# Altium schematic symbol library Brian_.SchLib: 123 symbols (part 4 of 4)
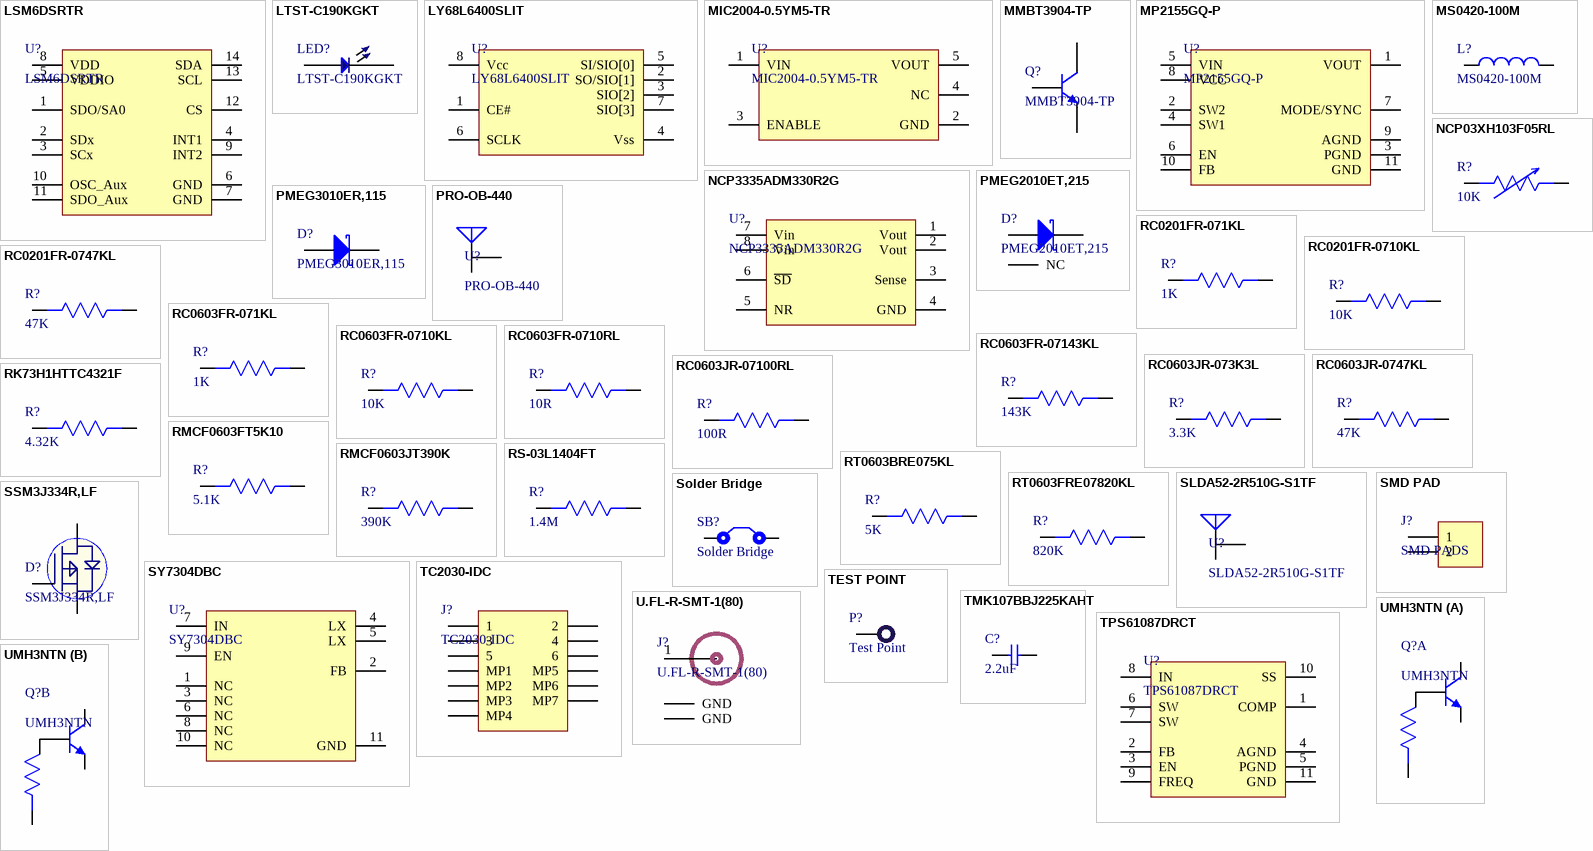
[diagram p6: symbols LSM6DSRTR to UMH3NTN]

## RT0603BRE075KL
designator R?, comment 5K
RES 5K OHM 0.1% 1/10W 0603; Manufacturer: Yageo; Manufacturer Part Number: RT0603BRE075KL; Resistance: 5kR; Max Power Dissipation: 100mW; Temperature Coefficient: 50ppm/°C; Supplier 1: Avnet; RoHS: No; Category: Chip SMD Resistors; Pricing 1: 5000=0.03371, 10000=0.03324, 20000=0.03229, 30000=0.03157, 40000=0.03039, 50000=0.02968, 500000=0.02896 (USD); Case/Package: 0603; Min Operating Temperature: -55°C; Max Operating Temperature: 155°C; Resistor Type: Thin Film; Packaging: Tape and Reel; Tolerance: 0.1%; Number of Terminations: 2; ComponentLink1URL: http://www.yageo.com/documents/recent/PYu-RT_1-to-0.01_RoHS_L_9.pdf?src-supplier=Digi-Key; ComponentLink1Description: http://www.yageo.com/documents/recent/PYu-RT_1-to-0.01_RoHS_L_9.pdf?src-supplier=Digi-Key; Supplier Part Number 1: RT0603BRE075KL
footprint Res0603
pins: 1, 2

## RT0603FRE07820KL
designator R?, comment 820K
RES SMD 820K OHM 1% 1/10W 0603; Manufacturer: Yageo; Manufacturer Part Number: RT0603FRE07820KL; Resistance: 820kR; Max Power Dissipation: 100mW; Temperature Coefficient: 50ppm/°C; Supplier 1: Digi-Key; RoHS: Yes; Category: Chip SMD Resistors; Stock 1: 7342; Pricing 1: 1=0.10000, 10=0.07000, 100=0.02830, 1000=0.01272, 2500=0.01104 (USD); Case/Package: 0603; Min Operating Temperature: -55°C; Max Operating Temperature: 155°C; Packaging: Tape and Reel; Resistor Type: Thin Film; Number of Terminations: 2; Tolerance: 1%; Features: Moisture Resistant; Length: 0.063inch; Width: 0.031inch; Height: 0.022inch; RoHS Compliant: Yes; ComponentLink1URL: http://www.yageo.com/documents/recent/PYu-RT_1-to-0.01_RoHS_L_8.pdf?src-supplier=Digi-Key; ComponentLink1Description: http://www.yageo.com/documents/recent/PYu-RT_1-to-0.01_RoHS_L_8.pdf?src-supplier=Digi-Key; Supplier Part Number 1: 13-RT0603FRE07820KLCT-ND
footprint Res0603
pins: 1, 2

## SLDA52-2R510G-S1TF
designator U?
RF ANT 2.51GHZ CHIP SOLDER SMD; Manufacturer: Sunlord; Supplier 1: Digi-Key; Manufacturer Part Number: SLDA52-2R510G-S1TF; Stock 1: 0; Pricing 1: 4000=0.3 (USD); Supplier Part Number 1: 3442-SLDA52-2R510G-S1TFTR-ND
footprint SLDA52-2R510G-S1TF
pins: 1 A, 2 A

## SMD PAD
designator J?, comment SMD PADS
footprint SMD PAD (SMD 0805)
pins: 1, 2

## Solder Bridge
designator SB?
Solder Bridge ON
footprint Solder Bridge (Solder Bridge ON)
pins: 1, 2

## SSM3J334R,LF
designator D?
MOSFET P-CH 30V 4A SOT23F; Manufacturer: Toshiba; Number of Elements: 1; Element Configuration: Single; Drain to Source Breakdown Voltage: -30V; Rds On Max: 71mR; Input Capacitance: 280pF; Gate to Source Voltage (Vgs): 20V; Drain to Source Resistance: 136mR; Power Dissipation: 1W; Supplier 1: Digi-Key; Manufacturer Part Number: SSM3J334R,LF; RoHS: Yes; Category: MOSFETs; Stock 1: 79343; Pricing 1: 1=0.47000, 10=0.33100, 25=0.30800, 100=0.16720, 500=0.13640, 1000=0.10120 (USD); Mount: Surface Mount; Case/Package: SOT-23-3; Number of Pins: 3; Min Operating Temperature: -55°C; Max Operating Temperature: 150°C; Packaging: Tape and Reel; Package Quantity: 1; Drain to Source Voltage (Vdss): 30V; Continuous Drain Current (ID): 4A; Max Power Dissipation: 1W; ComponentLink1URL: https://datasheet.ciiva.com/6375/ssm3j334r-datasheet-en-20140301-6375723.pdf?src-supplier=Digi-Key; ComponentLink1Description: https://datasheet.ciiva.com/6375/ssm3j334r-datasheet-en-20140301-6375723.pdf?src-supplier=Digi-Key; ComponentLink2URL: https://datasheet.ciiva.com/6373/ssm3j334r-datasheet-en-20140301-6373837.pdf?src-supplier=Digi-Key; ComponentLink2Description: https://datasheet.ciiva.com/6373/ssm3j334r-datasheet-en-20140301-6373837.pdf?src-supplier=Digi-Key; Supplier Part Number 1: SSM3J334RLFCT-ND
footprint SOT-23F
pins: 1 G, 2 S, 3 D

## SY7304DBC
designator U?
33V 4A DFN-10 DC-DC Converters RoHS; Manufacturer: Silergy Corp; Function: Step-Up; Output Configuration: Positive; Topology: Boost; Output Type: Adjustable; Number of Outputs: 1; Voltage - Input (Min): 3V; Voltage - Output (Min/Fixed): 0.6V; Frequency - Switching: 1MHz; Package: DFN-10; Voltage - Input (Max): 33V; Voltage - Output (Max): 33V; Current - Output: 4A
footprint DFN-10 (33V 4A DFN-10 DC-DC Converters RoHS)
pins: 1 NC, 2 FB, 3 NC, 4 LX, 5 LX, 6 NC, 7 IN, 8 NC, 9 EN, 10 NC, 11 GND

## TC2030-IDC
designator J?
CABLE ADAPTER 6 POS; Manufacturer: Tag-Connect; ComponentLink1URL: http://www.tag-connect.com/Materials/TC2030-MCP%20Datasheet.pdf?src-supplier=Digi-Key; ComponentLink1Description: http://www.tag-connect.com/Materials/TC2030-MCP%20Datasheet.pdf?src-supplier=Digi-Key; Supplier 1: Digi-Key; Manufacturer Part Number: TC2030-IDC; Stock 1: 284; Pricing 1: 1=43.71 (USD); Package Quantity: 1; Supplier Part Number 1: TC2030-IDC-ND
footprint TC2030-IDC (CABLE ADAPTER 6 POS)
pins: 1, 2, 3, 4, 5, 6, MP1, MP2, MP3, MP4, MP5, MP6, MP7

## TEST POINT
designator P?, comment Test Point
Test Point ON
footprint TEST POINT
pins: 1

## TMK107BBJ225KAHT
designator C?, comment 2.2uF
2.2uF ±10% 25V X5R 0603 Multilayer Ceramic Capacitors MLCC - SMD/SMT RoHS; Manufacturer: Taiyo Yuden; Manufacturer Part No: TMK107BBJ225KAHT; Package: 0603; Value: 2.2uF
footprint Cap0603
pins: 1, 2

## TPS61087DRCT
designator U?
IC REG BOOST ADJ 3.2A 10SON; Manufacturer: Texas Instruments; Output Voltage: 18.5V; Number of Outputs: 1; Switching Frequency: 1.5MHz; Max Input Voltage: 6V; Min Input Voltage: 2.5V; Synchronous Rectifier: No; Min Output Voltage: 3V; Quiescent Current: 75uA; Output Type: Adjustable; Frequency: 1.2MHz; Supplier 1: Digi-Key; Manufacturer Part Number: TPS61087DRCT; RoHS: Yes; Category: Voltage Regulators - Switching; Stock 1: 8; Pricing 1: 1=2.47000, 10=2.21600, 25=2.09080, 100=1.78140 (USD); Case/Package: VSON; Number of Pins: 10; Weight: 0.000885oz; Contact Plating: Gold; Min Operating Temperature: -40°C; Max Operating Temperature: 85°C; Output Current: 3.2A; Package Quantity: 1; Packaging: Tape and Reel; Max Output Current: 3.2A; Max Output Voltage: 18.5V; Topology: Boost; Operating Supply Voltage: 6V; Series: -; Min Supply Voltage: 2.5V; Termination: SMD/SMT; Length: 3mm; Width: 3mm; Height: 0.9mm; Lead Free: Lead Free; RoHS Compliant: Yes; REACH SVHC: No SVHC; ComponentLink1URL: https://datasheet.ciiva.com/26900/tps61087drct-26900849.pdf?src-supplier=IIIC; ComponentLink1Description: https://datasheet.ciiva.com/26900/tps61087drct-26900849.pdf?src-supplier=IIIC; ComponentLink2URL: https://datasheet.ciiva.com/2026/tps61087-2026442.pdf?src-supplier=Digi-Key; ComponentLink2Description: https://datasheet.ciiva.com/2026/tps61087-2026442.pdf?src-supplier=Digi-Key; ComponentLink3URL: https://datasheet.ciiva.com/7993/1853604-7993946.pdf?src-supplier=Element14; ComponentLink3Description: https://datasheet.ciiva.com/7993/1853604-7993946.pdf?src-supplier=Element14; ComponentLink4URL: https://datasheet.ciiva.com/2026/tps61087-2026443.pdf?src-supplier=Digi-Key; ComponentLink4Description: https://datasheet.ciiva.com/2026/tps61087-2026443.pdf?src-supplier=Digi-Key; ComponentLink5URL: https://datasheet.ciiva.com/2026/tps61087-2026444.pdf?src-supplier=Digi-Key; ComponentLink5Description: https://datasheet.ciiva.com/2026/tps61087-2026444.pdf?src-supplier=Digi-Key; ComponentLink6URL: https://datasheet.ciiva.com/7143/1853604-7143100.pdf?src-supplier=Newark; ComponentLink6Description: https://datasheet.ciiva.com/7143/1853604-7143100.pdf?src-supplier=Newark; ComponentLink7URL: https://datasheet.ciiva.com/14377/tps61087-14377084.pdf?src-supplier=Avnet; ComponentLink7Description: https://datasheet.ciiva.com/14377/tps61087-14377084.pdf?src-supplier=Avnet; Supplier Part Number 1: 296-23426-1-ND
footprint 10-VSON (3x3)
pins: 1 COMP, 2 FB, 3 EN, 4 AGND, 5 PGND, 6 SW, 7 SW, 8 IN, 9 FREQ, 10 SS, 11 GND

## U.FL-R-SMT-1(80)
designator J?
CONN U.FL RCPT STR 50 OHM SMD; Manufacturer: Hirose; Supplier 1: Future Electronics; Manufacturer Part Number: U.FL-R-SMT-1(80); Stock 1: 1272; Pricing 1: 1=1.07, 500=0.785, 1500=0.74, 2500=0.72, 5000=0.695 (USD); Case/Package: SMD/SMT; Package Quantity: 10000; Packaging: Tape and Reel; Lead Free: Lead Free; ComponentLink1URL: https://www.hirose.com/product/en/download_file/key_name/U.FL-R-SMT-1%2880%29/category/Specification%20Sheet/doc_file_id/37638/?file_category_id=9&item_id=03310472280&is_series=&src-supplier=Digi-Key; ComponentLink1Description: https://www.hirose.com/product/en/download_file/key_name/U.FL-R-SMT-1%2880%29/category/Specification%20Sheet/doc_file_id/37638/?file_category_id=9&item_id=03310472280&is_series=&src-supplier=Digi-Key; ComponentLink2URL: http://www.mouser.com/ds/2/185/U.FL_catalog-939761.pdf?src-supplier=Mouser; ComponentLink2Description: http://www.mouser.com/ds/2/185/U.FL_catalog-939761.pdf?src-supplier=Mouser; Supplier Part Number 1: U.FL-R-SMT-1(80)-CUTT
footprint U.FL-R-SMT-1(80)
pins: 1 RF_IN, 2 GND, 3 GND

## UMH3NTN
designator Q?
TRANS 2NPN PREBIAS 0.15W UMT6; Manufacturer: Rohm; Collector Emitter Voltage (VCEO): 50V; Emitter Base Voltage (VEBO): 5V; Max Collector Current: 100mA; Element Configuration: Dual; hFE Min: 100; Polarity: NPN; Power Dissipation: 150mW; Transition Frequency: 250MHz; Supplier 1: Digi-Key; Manufacturer Part Number: UMH3NTN; Stock 1: 12797; Pricing 1: 1=0.39, 10=0.293, 25=0.264, 100=0.1392, 500=0.12336, 1000=0.096 (USD); Mount: Surface Mount; Case/Package: SOT-363; Number of Pins: 6; Min Operating Temperature: -55°C; Max Operating Temperature: 150°C; Max Output Current: 100mA; Operating Supply Voltage: 50V; Packaging: Tape and Reel; Package Quantity: 1; Continuous Collector Current: 100mA; Collector Emitter Breakdown Voltage: 50V; Max Power Dissipation: 150mW; Max Breakdown Voltage: 50V; Voltage Rating (DC): 50V; Current Rating: 100mA; Collector Base Voltage (VCBO): 50V; Radiation Hardening: No; REACH SVHC: No SVHC; Lead Free: Lead Free; ComponentLink1URL: http://www.farnell.com/datasheets/1645293.pdf?src-supplier=Element14; ComponentLink1Description: http://www.farnell.com/datasheets/1645293.pdf?src-supplier=Element14; ComponentLink2URL: http://rohmfs.rohm.com/en/products/databook/datasheet/discrete/transistor/digital/emh3t2r-e.pdf?src-supplier=Digi-Key; ComponentLink2Description: http://rohmfs.rohm.com/en/products/databook/datasheet/discrete/transistor/digital/emh3t2r-e.pdf?src-supplier=Digi-Key; ComponentLink3URL: http://rohmfs.rohm.com/en/techdata_basic/transistor/taping/UMT6_TN_taping.pdf?src-supplier=Digi-Key; ComponentLink3Description: http://rohmfs.rohm.com/en/techdata_basic/transistor/taping/UMT6_TN_taping.pdf?src-supplier=Digi-Key; ComponentLink4URL: http://www.produktinfo.conrad.com/datenblaetter/125000-149999/140593-da-01-en-TRANSISTOR_UMH3_NTN_SOT_363.pdf?src-supplier=Conrad; ComponentLink4Description: http://www.produktinfo.conrad.com/datenblaetter/125000-149999/140593-da-01-en-TRANSISTOR_UMH3_NTN_SOT_363.pdf?src-supplier=Conrad; Supplier Part Number 1: UMH3NTNCT-ND
footprint SOT-363 (Dual Digital Transistors)
part A pins: 1 DTr1 E , 2 DTr1 B, 6 DTr1 C
part B pins: 3 DTr2 C, 4 DTr2 E, 5 DTr2 B

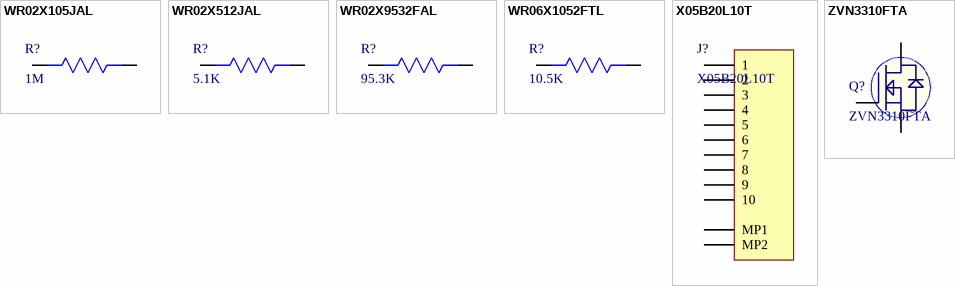
[diagram p3: symbols WR02X105JAL to ZVN3310FTA]

## WR02X105JAL
designator R?, comment 1M
Res Thick Film 0201 1M Ohm 5% 0.05W(1/20W) ±200ppm/C Molded SMD Paper T/R; Manufacturer: Walsin Technologies; Manufacturer Part Number: WR02X105JAL; Resistance: 1MR; Supplier 1: Digi-Key; RoHS: Yes; Category: Uncategorized; Stock 1: 6920; Pricing 1: 1=0.10000, 10=0.01800, 100=0.00750, 1000=0.00335, 2500=0.00291, 5000=0.00240 (USD); Case/Package: 0201; Min Operating Temperature: -55°C; Max Operating Temperature: 125°C; Resistor Type: Thick Film; Tolerance: 5%; Packaging: Tape and Reel; Length: 0.6mm; Depth: 0.3mm; Military Standard: Not; ComponentLink1URL: http://components.arrow.com/part/dataview/0323_00666329?src-supplier=Arrow+Europe; ComponentLink1Description: http://components.arrow.com/part/dataview/0323_00666329?src-supplier=Arrow+Europe; Supplier Part Number 1: 1292-WR02X105JALCT-ND
footprint Res-0201
pins: 1, 2

## WR02X512JAL
designator R?, comment 5.1K
Res 5.1K Ohm 5% 1/20W 0201; Manufacturer: Walsin Technologies; Manufacturer Part Number: WR02X512JAL; Supplier 1: DigiKey; Pricing 1: 15000=0.00209 (USD); RoHS Compliant: Yes; Supplier Part Number 1: 1292-WR02X512JALTR-ND
footprint Res-0201
pins: 1, 2

## WR02X9532FAL
designator R?, comment 95.3K
Res 95.3K Ohm 1% 1/20W 0201; Manufacturer: Walsin Technologies; Manufacturer Part Number: WR02X9532FAL; Supplier 1: Digi-Key; Pricing 1: 15000=0.00247 (USD); Supplier Part Number 1: 1292-WR02X9532FALTR-ND
footprint Res-0201
pins: 1, 2

## WR06X1052FTL
designator R?, comment 10.5K
10.5kΩ ±1% 0.1W ±100ppm/℃ 0603 Chip Resistor - Surface Mount RoHS; Manufacturer: Walsin Technologies; Manufacturer Part Number: WR06X1052FTL; Power Rating: 100mW; Voltage Rating (DC): 75V; Resistance: 10500R; Supplier 1: Digi-Key; RoHS: Yes; Category: Resistors; Pricing 1: 5000=0.00181 (USD); Case/Package: Molded; Contact Material: Tin; Tolerance: 1%; Lead Free: Lead Free; RoHS Compliant: Yes; ComponentLink1URL: http://components.arrow.com/part/dataview/0323_00667342?src-supplier=Arrow+Europe; ComponentLink1Description: http://components.arrow.com/part/dataview/0323_00667342?src-supplier=Arrow+Europe; ComponentLink2URL: http://www.farnell.com/datasheets/1960319.pdf?src-supplier=Farnell; ComponentLink2Description: http://www.farnell.com/datasheets/1960319.pdf?src-supplier=Farnell; Supplier Part Number 1: 1292-WR06X1052FTLTR-ND
footprint Res0603
pins: 1, 2

## X05B20L10T
designator J?
Bottom Contact 10 0.020"（0.50mm） 0.079"（2.00mm） Slide Lock SMD,P=0.5mm FFC, FPC Connectors RoHS; Manufacturer: XKB Connectivity; Number of Positions: 10; FFC, FCB Thickness: 0.30mm; Package: SMD,P=0.5mm; Packaging: Tube-packed; Flat Flex Type: FPC; Contact Type: Bottom Contact; Pitch: 0.020"（0.50mm; Height Above Board: 0.079"（2.00mm）; Locking Feature: Slide Lock
footprint X05B20L10T (Bottom Contact 10 0.020"(0.50mm) 0.079"(2.00mm) Slide Lock SMD,P=0.5mm FFC, FPC Connectors RoHS)
pins: 1, 2, 3, 4, 5, 6, 7, 8, 9, 10, MP1, MP2

## ZVN3310FTA
designator Q?
MOSFET N-CH 100V .1A SOT23-3; Manufacturer: Diodes Zetex; Rise Time: 5ns; Continuous Drain Current (ID): 100mA; Gate to Source Voltage (Vgs): 20V; Turn-Off Delay Time: 4ns; Turn-On Delay Time: 3ns; Rds On Max: 10R; Input Capacitance: 40pF; Nominal Vgs: 2.4V; Max Power Dissipation: 330mW; Number of Elements: 1; Element Configuration: Single; Supplier 1: Digi-Key; Manufacturer Part Number: ZVN3310FTA; Stock 1: 16974; Pricing 1: 1=0.59, 10=0.517, 25=0.4852, 100=0.3522, 250=0.33972, 500=0.29432, 1000=0.25048 (USD); Mount: Surface Mount; Case/Package: SOT-23; Number of Pins: 3; Weight: 0.000282oz; Min Operating Temperature: -55°C; Max Operating Temperature: 150°C; Package Quantity: 3000; Packaging: Tape and Reel; Dual Supply Voltage: 100V; Drain to Source Voltage (Vdss): 100V; Number of Channels: 1; Drain to Source Breakdown Voltage: 100V; Drain to Source Resistance: 10R; Fall Time: 5ns; On-State Resistance: 10R; Power Dissipation: 330mW; Termination: SMD/SMT; Threshold Voltage: 2.4V; Voltage Rating (DC): 100V; Current Rating: 100mA; Current: 100mA; Voltage: 100V; Length: 3.04mm; Height: 1.02mm; Width: 1.4mm; Radiation Hardening: No; REACH SVHC: No SVHC; Lead Free: Lead Free; ComponentLink1URL: http://www.diodes.com/_files/datasheets/ZVN3310F.pdf?src-supplier=Digi-Key; ComponentLink1Description: http://www.diodes.com/_files/datasheets/ZVN3310F.pdf?src-supplier=Digi-Key; Supplier Part Number 1: ZVN3310FCT-ND
footprint SOT-23 (TRANS NPN 40V 0.6A SOT23)
pins: 1 G, 2 S, 3 D